# Altium schematic symbol library TQP3M9036.SchLib: 1 symbol
Pins are listed as number, name and electrical type; pins without a type are passive.

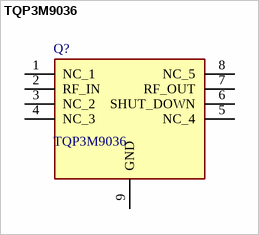
[diagram p0: symbol TQP3M9036]

## TQP3M9036
designator Q?
RF Amplifier 400-2000MHz NF.45dB Gain 19dB @.9GHz LNA; Manufacturer_Name: Qorvo; Geometry.Height: 0.95mm; Mouser Part Number: 772-TQP3M9036; Mouser Price/Stock: https://www.mouser.co.uk/ProductDetail/Qorvo/TQP3M9036?qs=73ok1p1Z9vuHVw3N%2FSkE8w%3D%3D; Manufacturer_Part_Number: TQP3M9036; Datasheet Link: https://www.qorvo.com/products/d/da005543
footprint SON50P200X200X95-9N-D
pins: 1 NC_1, 2 RF_IN, 3 NC_2, 4 NC_3, 5 NC_4, 6 SHUT_DOWN, 7 RF_OUT, 8 NC_5, 9 GND